# EAGLE library part TPL5111DDCR (library astra)
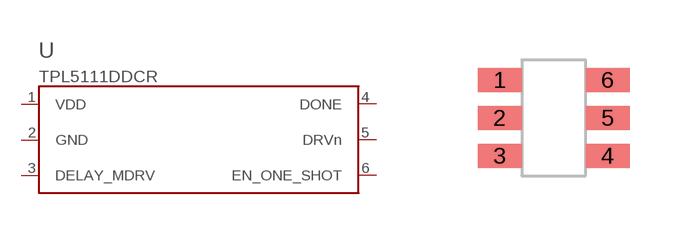
[diagram p10: symbol with the pads of TI_DDC6_TPL; footprint TI_DDC6_TPL]

Designator prefix U

## TPL5111DDCR  [TI_DDC6_TPL]
1  VDD  pwr
2  GND  pwr
3  DELAY_MDRV  in
4  DONE  in
5  DRVn  out
6  EN_ONE_SHOT  in

## Footprint TI_DDC6_TPL (pad centres in mm)
TI TPL5111 DDC0006A, example board layout, 1.10 x 0.60, rows 2.70, pitch 0.95. Pin 1 upper left.
smd 1.1 x 0.6: 1 -1.35,0.95; 2 -1.35,0; 3 -1.35,-0.95; 4 1.35,-0.95; 5 1.35,0; 6 1.35,0.95